# Altium footprint library LimeMicroAltiumLib.PcbLib: 876 footprints (part 12 of 57)
Each footprint in its own frame and in the unit in brackets; x right, y up, seen from the top. Pads: shape width x height; smd on the part's side, far side on the other; paste and mask are expansions set on the pad; w line width, h text height; cw(c..) or ccw(c..) is an arc to the next point about the centre after c.
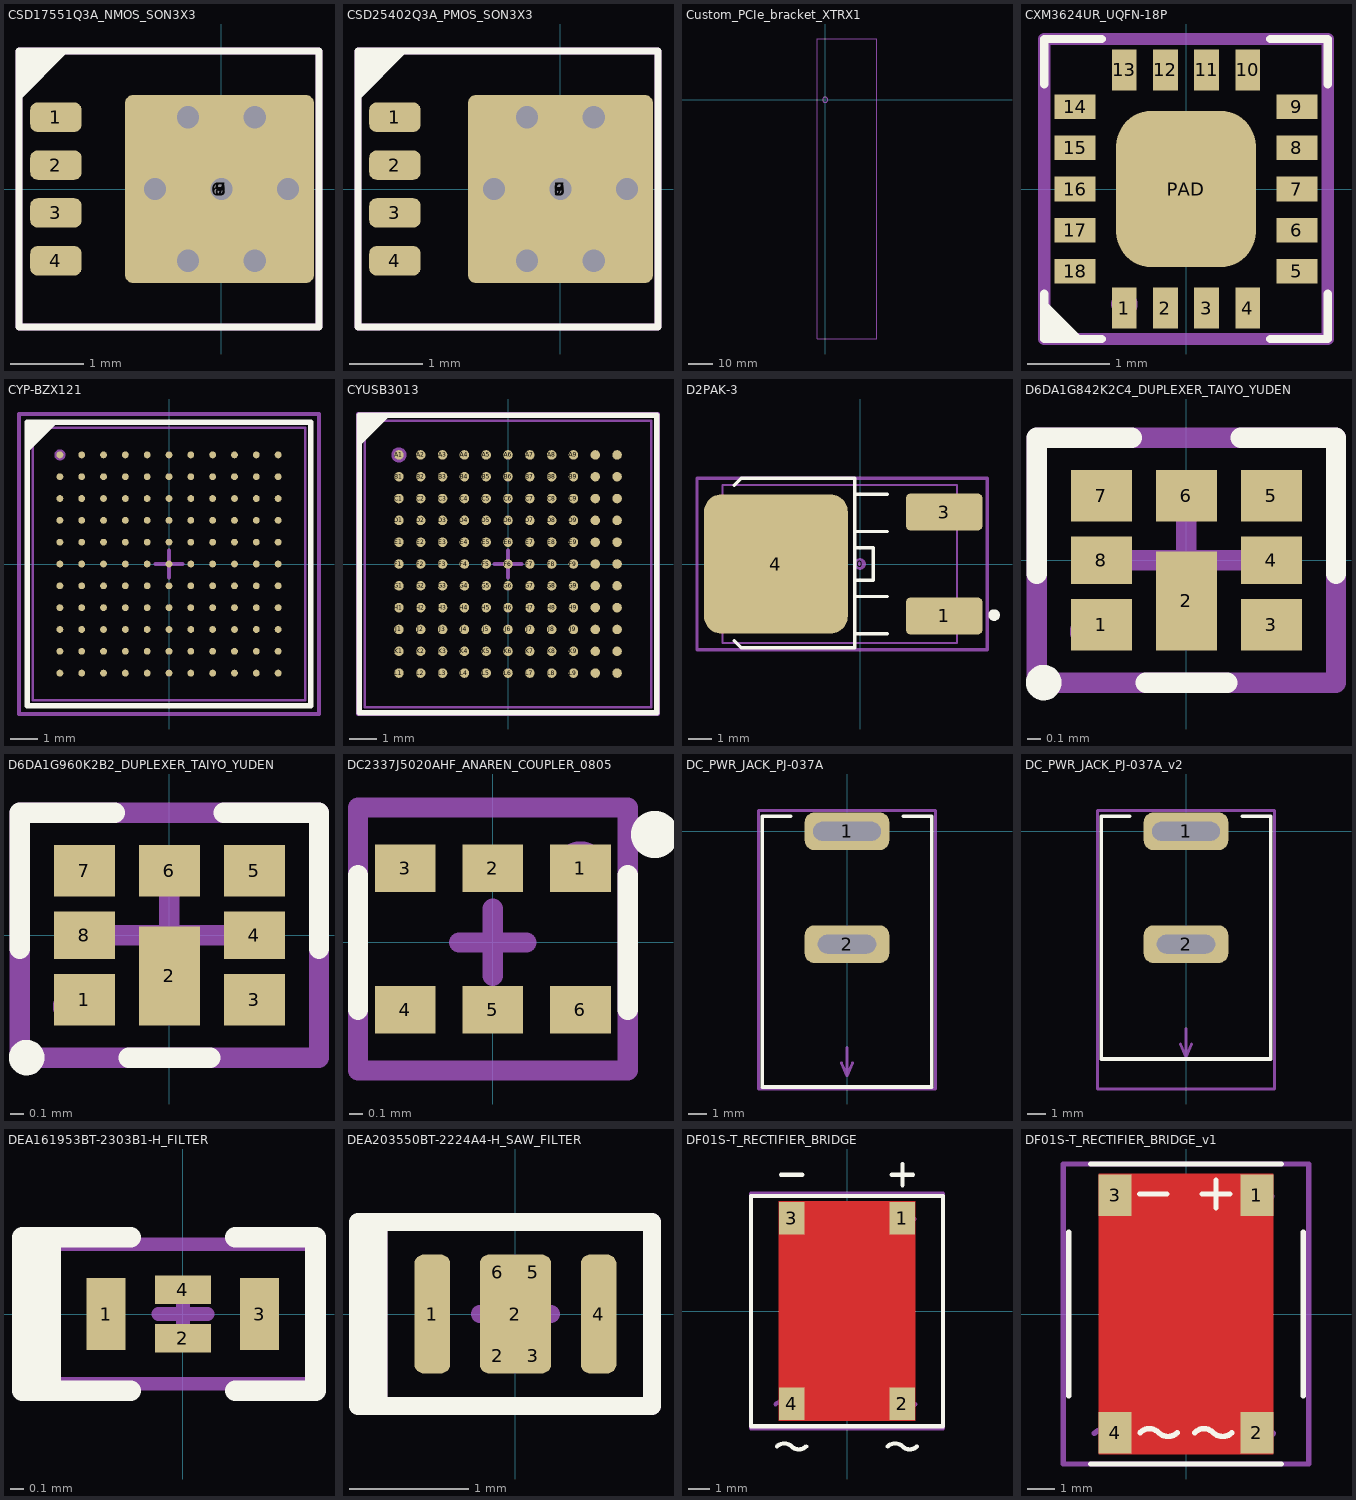
[diagram p11: the footprints below, top view; thin cyan lines are the x and y axes]

## CSD17551Q3A_NMOS_SON3X3 [mm]
pads (9):
  rrect50% 0.7x0.4 smd paste-1000 mask+0.05: 1(-2.248,0.975) 2(-2.248,0.325) 3(-2.248,-0.325) 4(-2.248,-0.975)
  rrect8% 2.51x2.55 smd paste-1000 mask+0.05: 5(0,0) 6(-0.053,0) 7(0,0) 8(0,0) 9(0,0)
via -0.453,0.975 diameter 0.6 hole 0.3
via 0.452,0.975 diameter 0.6 hole 0.3
via -0.453,-0.975 diameter 0.6 hole 0.3
via 0.452,-0.975 diameter 0.6 hole 0.3
via -0.905,0 diameter 0.6 hole 0.3
via 0,0 diameter 0.6 hole 0.3
via 0.905,0 diameter 0.6 hole 0.3
Top Overlay:
  region: -2.75,1.875 -2.75,1.2 -2.075,1.875
  lines w0.1: -2.75,-1.875 1.325,-1.875 1.325,1.875 -2.75,1.875 -2.75,-1.875
Top Paste:
  drawing of 12 lines, arcs and shapes, not listed
Top Solder:
  drawing of 5 lines, arcs and shapes, not listed
Mechanical 15:
  circle w0.15: c-2.275,0.975 r0.056
  lines w0.1: -0.5,0 0,0 ; 0,-0.5 0,0 ; 0,0.5 0,0 ; 0.5,0 0,0 ; -2.75,-1.875 -2.75,1.875 1.325,1.875 1.325,-1.875 -2.75,-1.875
  text ".Designator" at 0,0 h0.55
3D body "Trans_Texas_Instruments_CSD17551Q3A_eec.STEP": height 0.25, standoff 0, extent -2.698,-1.875 1.302,1.875

## CSD25402Q3A_PMOS_SON3X3 [mm]
pads (9):
  rrect50% 0.7x0.4 smd paste-1000 mask+0.05: 1(-2.248,0.975) 2(-2.248,0.325) 3(-2.248,-0.325) 4(-2.248,-0.975)
  rrect8% 2.51x2.55 smd paste-1000 mask+0.05: 5(0,0) 6(0,0) 7(0,0) 8(0,0) 9(0,0)
via -0.453,0.975 diameter 0.6 hole 0.3
via 0.452,0.975 diameter 0.6 hole 0.3
via -0.453,-0.975 diameter 0.6 hole 0.3
via 0.452,-0.975 diameter 0.6 hole 0.3
via -0.905,0 diameter 0.6 hole 0.3
via 0,0 diameter 0.6 hole 0.3
via 0.905,0 diameter 0.6 hole 0.3
Top Overlay:
  region: -2.75,1.875 -2.75,1.2 -2.075,1.875
  lines w0.1: -2.75,-1.875 1.325,-1.875 1.325,1.875 -2.75,1.875 -2.75,-1.875
Top Paste:
  drawing of 12 lines, arcs and shapes, not listed
Top Solder:
  drawing of 5 lines, arcs and shapes, not listed
Mechanical 15:
  circle w0.15: c-2.275,0.975 r0.056
  lines w0.1: -0.5,0 0,0 ; 0,-0.5 0,0 ; 0,0.5 0,0 ; 0.5,0 0,0 ; -2.75,-1.875 -2.75,1.875 1.325,1.875 1.325,-1.875 -2.75,-1.875
  text ".Designator" at 0,0 h0.55
3D body "Trans_Texas_Instruments_CSD17551Q3A_eec.STEP": height 0.25, standoff 0, extent -2.698,-1.875 1.302,1.875

## Custom_PCIe_bracket_XTRX1 [mm] "3D STEP model of XTRX Custom-made PCIe bracket v1"
Mechanical 15:
  circle w0.2: c0,0 r1.047
  lines w0.15: -3.2,-96.4 20.8,-96.4 20.8,24.5 -3.2,24.5 -3.2,-96.4
  text ".Designator" at 7.5,-10.6 h0.55
3D body "PCIe 1XTRX v11 Full Height Bracket w holes rev5.stp": height 4.45, standoff -17.15, extent -3.175,-96.367 20.828,24.492

## CXM3624UR_UQFN-18P [mm]
pads (19):
  rect 0.3x0.5 smd mask+0.05: 1(-0.75,-1.45) 2(-0.25,-1.45) 3(0.25,-1.45) 4(0.75,-1.45) 10(0.75,1.45) 11(0.25,1.45) 12(-0.25,1.45) 13(-0.75,1.45)
  rect 0.5x0.3 smd mask+0.05: 5(1.35,-1) 6(1.35,-0.5) 7(1.35,0) 8(1.35,0.5) 9(1.35,1) 14(-1.35,1) 15(-1.35,0.5) 16(-1.35,0) 17(-1.35,-0.5) 18(-1.35,-1)
  rrect50% 1.7x1.9 smd paste-0.1 mask+0.05: PAD(0,0)
Top Overlay:
  region: -1.725,-1.35 -1.25,-1.825 -1.725,-1.825
  lines w0.1: -1.725,-1.275 -1.725,-1.825 -1.025,-1.825 ; -1.725,1.275 -1.725,1.825 -1.025,1.825 ; 1.025,-1.825 1.725,-1.825 1.725,-1.275 ; 1.025,1.825 1.725,1.825 1.725,1.275
Mechanical 15:
  circle w0.25: c-0.75,-1.4 r0.035
  lines w0.15: -0.5,0 0,0 ; 0,-0.5 0,0 ; 0,0.5 0,0 ; 0.5,0 0,0 ; -1.725,-1.825 -1.725,1.825 1.725,1.825 1.725,-1.825 -1.725,-1.825
  text ".Designator" at 0,0 h0.55
3D body: height 0.56, standoff 0, extent -1.198,-1.3 -0.8,-0.9
3D body: height 0.55, standoff 0, extent -1.4,-1.5 1.4,1.5

## CYP-BZX121 [mm] "BGA, 121-Balls, Body 10x10mm, Pitch 0.8mm"
height 1.2
pads (121):
  round 0.25 smd: A1(-4,4) A2(-3.2,4) A3(-2.4,4) A4(-1.6,4) A5(-0.8,4) A6(0,4) A7(0.8,4) A8(1.6,4) A9(2.4,4) A10(3.2,4) A11(4,4) B1(-4,3.2) B2(-3.2,3.2) B3(-2.4,3.2) B4(-1.6,3.2) B5(-0.8,3.2) B6(0,3.2) B7(0.8,3.2) B8(1.6,3.2) B9(2.4,3.2) B10(3.2,3.2) B11(4,3.2) C1(-4,2.4) C2(-3.2,2.4) C3(-2.4,2.4) C4(-1.6,2.4) C5(-0.8,2.4) C6(0,2.4) C7(0.8,2.4) C8(1.6,2.4) C9(2.4,2.4) C10(3.2,2.4) C11(4,2.4) D1(-4,1.6) D2(-3.2,1.6) D3(-2.4,1.6) D4(-1.6,1.6) D5(-0.8,1.6) D6(0,1.6) D7(0.8,1.6) D8(1.6,1.6) D9(2.4,1.6) D10(3.2,1.6) D11(4,1.6) E1(-4,0.8) E2(-3.2,0.8) E3(-2.4,0.8) E4(-1.6,0.8) E5(-0.8,0.8) E6(0,0.8) E7(0.8,0.8) E8(1.6,0.8) E9(2.4,0.8) E10(3.2,0.8) E11(4,0.8) F1(-4,0) F2(-3.2,0) F3(-2.4,0) F4(-1.6,0) F5(-0.8,0) F6(0,0) F7(0.8,0) F8(1.6,0) F9(2.4,0) F10(3.2,0) F11(4,0) G1(-4,-0.8) G2(-3.2,-0.8) G3(-2.4,-0.8) G4(-1.6,-0.8) G5(-0.8,-0.8) G6(0,-0.8) G7(0.8,-0.8) G8(1.6,-0.8) G9(2.4,-0.8) G10(3.2,-0.8) G11(4,-0.8) H1(-4,-1.6) H2(-3.2,-1.6) H3(-2.4,-1.6) H4(-1.6,-1.6) H5(-0.8,-1.6) H6(0,-1.6) H7(0.8,-1.6) H8(1.6,-1.6) H9(2.4,-1.6) H10(3.2,-1.6) H11(4,-1.6) J1(-4,-2.4) J2(-3.2,-2.4) J3(-2.4,-2.4) J4(-1.6,-2.4) J5(-0.8,-2.4) J6(0,-2.4) J7(0.8,-2.4) J8(1.6,-2.4) J9(2.4,-2.4) J10(3.2,-2.4) J11(4,-2.4) K1(-4,-3.2) K2(-3.2,-3.2) K3(-2.4,-3.2) K4(-1.6,-3.2) K5(-0.8,-3.2) K6(0,-3.2) K7(0.8,-3.2) K8(1.6,-3.2) K9(2.4,-3.2) K10(3.2,-3.2) K11(4,-3.2) L1(-4,-4) L2(-3.2,-4) L3(-2.4,-4) L4(-1.6,-4) L5(-0.8,-4) L6(0,-4) L7(0.8,-4) L8(1.6,-4) L9(2.4,-4) L10(3.2,-4) L11(4,-4)
Top Overlay:
  region: -4.2,5.2 -5.2,4.2 -5.2,5.2
  lines w0.2: -5.2,4.2 -4.2,5.2 ; -5.2,-5.2 -5.2,5.2 5.2,5.2 5.2,-5.2 -5.2,-5.2
Mechanical 13:
  lines w0.1: -5,-5 -5,5 5,5 5,-5 -5,-5
Mechanical 15:
  circle w0.2: c-4,4 r0.1
  lines w0.15: -0.5,0 0.5,0 ; 0,-0.5 0,0.5 ; -5.5,-5.5 -5.5,5.5 5.5,5.5 5.5,-5.5 -5.5,-5.5
  text ".Designator" at 0,0 h0.55
3D body: height 1.2, standoff 0.15, extent -5,-5 5,5
3D body: height 1.3, standoff 1.2, extent -4.4,3.6 -3.6,4.4

## CYUSB3013 [mm] "BGA, 121-Leads, Body 10,50x10,50mmx1,10mm, Pitch 0,80mm"
height 1.1
pads (121):
  round 0.35 smd: A1(-4,4) A2(-3.2,4) A3(-2.4,4) A4(-1.6,4) A5(-0.8,4) A6(0,4) A7(0.8,4) A8(1.6,4) A9(2.4,4) A10(3.2,4) A11(4,4) B1(-4,3.2) B2(-3.2,3.2) B3(-2.4,3.2) B4(-1.6,3.2) B5(-0.8,3.2) B6(0,3.2) B7(0.8,3.2) B8(1.6,3.2) B9(2.4,3.2) B10(3.2,3.2) B11(4,3.2) C1(-4,2.4) C2(-3.2,2.4) C3(-2.4,2.4) C4(-1.6,2.4) C5(-0.8,2.4) C6(0,2.4) C7(0.8,2.4) C8(1.6,2.4) C9(2.4,2.4) C10(3.2,2.4) C11(4,2.4) D1(-4,1.6) D2(-3.2,1.6) D3(-2.4,1.6) D4(-1.6,1.6) D5(-0.8,1.6) D6(0,1.6) D7(0.8,1.6) D8(1.6,1.6) D9(2.4,1.6) D10(3.2,1.6) D11(4,1.6) E1(-4,0.8) E2(-3.2,0.8) E3(-2.4,0.8) E4(-1.6,0.8) E5(-0.8,0.8) E6(0,0.8) E7(0.8,0.8) E8(1.6,0.8) E9(2.4,0.8) E10(3.2,0.8) E11(4,0.8) F1(-4,0) F2(-3.2,0) F3(-2.4,0) F4(-1.6,0) F5(-0.8,0) F6(0,0) F7(0.8,0) F8(1.6,0) F9(2.4,0) F10(3.2,0) F11(4,0) G1(-4,-0.8) G2(-3.2,-0.8) G3(-2.4,-0.8) G4(-1.6,-0.8) G5(-0.8,-0.8) G6(0,-0.8) G7(0.8,-0.8) G8(1.6,-0.8) G9(2.4,-0.8) G10(3.2,-0.8) G11(4,-0.8) H1(-4,-1.6) H2(-3.2,-1.6) H3(-2.4,-1.6) H4(-1.6,-1.6) H5(-0.8,-1.6) H6(0,-1.6) H7(0.8,-1.6) H8(1.6,-1.6) H9(2.4,-1.6) H10(3.2,-1.6) H11(4,-1.6) J1(-4,-2.4) J2(-3.2,-2.4) J3(-2.4,-2.4) J4(-1.6,-2.4) J5(-0.8,-2.4) J6(0,-2.4) J7(0.8,-2.4) J8(1.6,-2.4) J9(2.4,-2.4) J10(3.2,-2.4) J11(4,-2.4) K1(-4,-3.2) K2(-3.2,-3.2) K3(-2.4,-3.2) K4(-1.6,-3.2) K5(-0.8,-3.2) K6(0,-3.2) K7(0.8,-3.2) K8(1.6,-3.2) K9(2.4,-3.2) K10(3.2,-3.2) K11(4,-3.2) L1(-4,-4) L2(-3.2,-4) L3(-2.4,-4) L4(-1.6,-4) L5(-0.8,-4) L6(0,-4) L7(0.8,-4) L8(1.6,-4) L9(2.4,-4) L10(3.2,-4) L11(4,-4)
Top Overlay:
  region: -4.45,5.45 -5.45,4.45 -5.45,5.45
  lines w0.2: -5.45,4.45 -4.45,5.45 ; -5.45,-5.45 -5.45,5.45 5.45,5.45 5.45,-5.45 -5.45,-5.45
Mechanical 13:
  lines w0.1: -5.25,-5.25 -5.25,5.25 5.25,5.25 5.25,-5.25 -5.25,-5.25
Mechanical 15:
  circle w0.35: c-4,4 r0.1
  lines w0.15: -0.5,0 0.5,0 ; 0,-0.5 0,0.5 ; -5.5,-5.5 -5.5,5.5 5.5,5.5 5.5,-5.5 -5.5,-5.5
  text ".Designator" at 0,0 h0.55
3D body: height 1.11, standoff 1, extent -4.397,3.601 -3.6,4.399
3D body: height 1.1, standoff 0.25, extent -5.25,-5.25 5.25,5.25

## D2PAK-3 [mm] "D-PAK/TO-263-3; 3 Leads (1 Cropped); Body 14.7 (inc. leads) x 10.2 mm (LxW max)"
height 4.572
pads (4):
  round 0.508 on Mech15: 0(0,0)
  rrect25% 3.3x1.6 smd: 1(3.626,-2.24) 3(3.626,2.24)
  rrect25% 6.2x6 smd: 4(-3.626,0)
Top Overlay:
  circle w0.25: c5.774,-2.2 r0.125
  lines w0.15: -5.426,-3.3 -5.126,-3.6 -0.225,-3.6 -0.225,3.7 -5.126,3.7 -5.426,3.4 ; 1.174,-3 -0.226,-3 -0.226,-1.4 1.174,-1.4 ; 1.174,1.4 -0.226,1.4 -0.226,3 1.174,3 ; -0.226,-0.7 0.574,-0.7 0.574,0.7 -0.226,0.7 -0.226,-0.7
Mechanical 13:
  lines w0.076: -5.928,-3.4 -5.928,3.4 4.174,3.4 4.174,-3.4 -5.928,-3.4
Mechanical 15:
  circle w0.3: c3.674,-2.2 r0.1
  lines w0.15: -7.026,-3.7 5.474,-3.7 5.474,3.7 -7.026,3.7 -7.026,-3.7
  text ".Designator" at 0,0 h0.55
3D body "User Library-DPAK_TO-252AA.step": height 2.37, standoff -0.03, extent -5.928,-3.367 4.172,3.367

## D6DA1G842K2C4_DUPLEXER_TAIYO_YUDEN [mm]
pads (8):
  rect 0.45x0.38 smd mask+0.05: 1(-0.625,-0.475) 3(0.625,-0.475) 5(0.625,0.475) 6(0,0.475) 7(-0.625,0.475)
  rect 0.45x0.73 smd mask+0.05: 2(0,-0.3)
  rect 0.45x0.35 smd mask+0.05: 4(0.625,0) 8(-0.625,0)
Top Overlay:
  circle w0.15: c-1.05,-0.9 r0.056
  lines w0.15: -1.1,-0.1 -1.1,0.9 -0.4,0.9 ; -0.3,-0.9 0.3,-0.9 ; 0.4,0.9 1.1,0.9 1.1,-0.1
Top Solder:
  region: -0.9,0.715 -0.9,-0.715 0.9,-0.715 0.9,0.715
Mechanical 13:
  region: -0.775,-0.6 -0.775,-0.37 -0.475,-0.37 -0.475,-0.6
  region: -0.775,-0.14 -0.775,0.09 -0.475,0.09 -0.475,-0.14
  region: -0.775,0.32 -0.775,0.55 -0.475,0.55 -0.475,0.32
  region: -0.15,0.32 -0.15,0.55 0.15,0.55 0.15,0.32
  region: 0.775,0.32 0.775,0.55 0.475,0.55 0.475,0.32
  region: 0.775,-0.14 0.775,0.09 0.475,0.09 0.475,-0.14
  region: 0.775,-0.6 0.775,-0.37 0.475,-0.37 0.475,-0.6
  region: -0.15,-0.6 -0.15,-0.025 0.15,-0.025 0.15,-0.6
Mechanical 15:
  circle w0.15: c-0.725,-0.525 r0.056
  lines w0.15: -0.4,0 0,0 ; 0,-0.4 0,0 ; 0,0.4 0,0 ; 0.4,0 0,0 ; -1.1,-0.9 1.1,-0.9 1.1,0.9 -1.1,0.9 -1.1,-0.9
  text ".Designator" at 0,0 h0.55
3D body: height 0.59, standoff 0, extent -0.724,-0.57 -0.525,-0.37
3D body: height 0.57, standoff 0, extent -0.9,-0.7 0.9,0.7

## D6DA1G960K2B2_DUPLEXER_TAIYO_YUDEN [mm]
pads (8):
  rect 0.45x0.38 smd mask+0.05: 1(-0.625,-0.475) 3(0.625,-0.475) 5(0.625,0.475) 6(0,0.475) 7(-0.625,0.475)
  rect 0.45x0.73 smd mask+0.05: 2(0,-0.3)
  rect 0.45x0.35 smd mask+0.05: 4(0.625,0) 8(-0.625,0)
Top Overlay:
  circle w0.15: c-1.05,-0.9 r0.056
  lines w0.15: -1.1,-0.1 -1.1,0.9 -0.4,0.9 ; -0.3,-0.9 0.3,-0.9 ; 0.4,0.9 1.1,0.9 1.1,-0.1
Top Solder:
  region: -0.9,0.715 -0.9,-0.715 0.9,-0.715 0.9,0.715
Mechanical 13:
  region: -0.775,-0.6 -0.775,-0.37 -0.475,-0.37 -0.475,-0.6
  region: -0.775,-0.14 -0.775,0.09 -0.475,0.09 -0.475,-0.14
  region: -0.775,0.32 -0.775,0.55 -0.475,0.55 -0.475,0.32
  region: -0.15,0.32 -0.15,0.55 0.15,0.55 0.15,0.32
  region: 0.775,0.32 0.775,0.55 0.475,0.55 0.475,0.32
  region: 0.775,-0.14 0.775,0.09 0.475,0.09 0.475,-0.14
  region: 0.775,-0.6 0.775,-0.37 0.475,-0.37 0.475,-0.6
  region: -0.15,-0.6 -0.15,-0.025 0.15,-0.025 0.15,-0.6
Mechanical 15:
  circle w0.15: c-0.725,-0.525 r0.056
  lines w0.15: -0.4,0 0,0 ; 0,-0.4 0,0 ; 0,0.4 0,0 ; 0.4,0 0,0 ; -1.1,-0.9 1.1,-0.9 1.1,0.9 -1.1,0.9 -1.1,-0.9
  text ".Designator" at 0,0 h0.55
3D body: height 0.59, standoff 0, extent -0.724,-0.57 -0.525,-0.37
3D body: height 0.57, standoff 0, extent -0.9,-0.7 0.9,0.7

## DC2337J5020AHF_ANAREN_COUPLER_0805 [mm]
pads (6):
  rect 0.45x0.35 smd mask+0.05: 1(0.65,0.55) 2(0,0.55) 3(-0.65,0.55) 4(-0.65,-0.5) 5(0,-0.5) 6(0.65,-0.5)
Top Overlay:
  circle w0.3: c1.2,0.8 r0.025
  lines w0.15: -1,-0.5 -1,0.5 ; 1,-0.5 1,0.5
Mechanical 15:
  circle w0.3: c0.65,0.575 r0.025
  lines w0.15: -0.25,0 0.25,0 ; 0,-0.25 0,0.25 ; -1,-0.95 1,-0.95 1,1 -1,1 -1,-0.95
  text ".Designator" at 0,0 h0.55
3D body: height 0.6, standoff 0, extent 0.463,-0.075 0.663,0.15
3D body: height 0.6, standoff 0, extent -1,-0.6 1,0.6

## DC_PWR_JACK_PJ-037A [mm]
pads (2):
  rrect50% 4.5x2 hole 1 slot 3.6 at 0 deg mask+0.05: 1(0,0)
  rrect50% 4.5x2 hole 1 slot 3.1 at 0 deg mask+0.05: 2(0,-6)
Top Overlay:
  lines w0.2: -3,0.8 -4.5,0.8 -4.5,-13.6 4.5,-13.6 4.5,0.8 3,0.8
Mechanical 15:
  lines w0.15: -0.3,-12.3 0,-13 ; 0,-11.5 0,-13 ; 0.3,-12.3 0,-13 ; -4.7,-13.7 4.7,-13.7 4.7,1.1 -4.7,1.1 -4.7,-13.7
  text "board edge" at -2.6,-11.1 h0.55
  text ".Designator" at 0,0 h0.55
3D body "CUI_PJ-037A.step": height 11, standoff -3.5, extent -4.5,-13.7 4.5,0.8

## DC_PWR_JACK_PJ-037A_v2 [mm]
pads (2):
  rrect50% 4.5x2 hole 1 slot 3.6 at 0 deg mask+0.05: 1(0,0)
  rrect50% 4.5x2 hole 1 slot 3.1 at 0 deg mask+0.05: 2(0,-6)
Top Overlay:
  lines w0.2: -3,0.8 -4.5,0.8 -4.5,-12.1 4.5,-12.1 4.5,0.8 3,0.8
Mechanical 15:
  lines w0.15: -0.3,-11.3 0,-12 ; 0,-10.5 0,-12 ; 0.3,-11.3 0,-12 ; -4.7,-13.7 4.7,-13.7 4.7,1.1 -4.7,1.1 -4.7,-13.7
  text "board edge" at -2.6,-10.1 h0.55
  text ".Designator" at 0,0 h0.55
3D body "CUI_PJ-037A.step": height 11, standoff -3.5, extent -4.5,-13.7 4.5,0.8

## DEA161953BT-2303B1-H_FILTER [mm]
pads (4):
  rect 0.28x0.514 smd mask+0.02: 1(-0.55,0) 3(0.55,0)
  rect 0.4x0.205 smd mask+0.02: 2(0,-0.175) 4(0,0.175)
Top Overlay:
  region: -0.95,0.55 -1.15,0.55 -1.15,-0.55 -0.95,-0.55
  lines w0.15: -0.375,-0.55 -0.95,-0.55 ; -0.375,0.55 -0.95,0.55 ; 0.375,-0.55 0.95,-0.55 0.95,0.55 0.375,0.55 ; -0.95,-0.55 -1.15,-0.55 -1.15,0.55 -0.95,0.55 ; -0.95,-0.55 -0.95,0.55
Mechanical 15:
  circle w0.1: c-0.6,0 r0.035
  lines w0.1: -0.175,0 0.175,0 ; 0,-0.175 0,0.175 ; -1.175,-0.5 -1.175,0.5 0.975,0.5 0.975,-0.5 -1.175,-0.5
  text ".Designator" at 0,0 h0.55
3D body: height 2.05, standoff -0.7, extent -0.8,-0.4 0.8,0.4

## DEA203550BT-2224A4-H_SAW_FILTER [mm]
pads (7):
  rrect50% 0.3x1 smd mask+0.05: 1(-0.7,0) 4(0.7,0)
  rrect50% 0.3x0.3 smd mask+0.05: 2(-0.15,-0.35) 3(0.15,-0.35) 5(0.15,0.35) 6(-0.15,0.35)
  rrect50% 0.6x1 smd mask+0.05: 2(0,0)
Top Overlay:
  region: -1.15,-0.775 -1.325,-0.775 -1.325,0.775 -1.15,0.775
  lines w0.15: -1.15,-0.775 -1.325,-0.775 -1.325,0.775 -1.15,0.775 ; -1.15,-0.775 -1.15,0.775 ; -1.15,-0.775 1.15,-0.775 1.15,0.775 -1.15,0.775
Mechanical 15:
  lines w0.15: -0.3,0 0,0 ; 0,-0.3 0,0 ; 0,0.3 0,0 ; 0.3,0 0,0 ; -1.15,-0.775 -1.15,0.775 1.15,0.775 1.15,-0.775 -1.15,-0.775
  text ".Designator" at 0.15,0 h0.55
  text "1" at -0.8,0.2 h0.3
  text "4" at 0.7,0.2 h0.3
  text "IN" at -0.8,-0.5 h0.3
  text "OUT" at 0.1,-0.5 h0.3
3D body: height 0.65, standoff 0, extent -1,-0.625 1,0.625
3D body: height 0.65, standoff 0, extent -0.85,-0.375 -0.45,0.375

## DF01S-T_RECTIFIER_BRIDGE [mm]
pads (4):
  rect 1.2x1.52 smd mask+0.05: 1(2.6,4.35) 2(2.6,-4.35) 3(-2.6,4.35) 4(-2.6,-4.35)
Top Layer:
  pour cut-out: -3.2,-5.15 -3.2,5.15 3.2,5.15 3.2,-5.15
Top Overlay:
  lines w0.2: -3.283,-6.35 cw(c-2.941,-6.691) -2.941,-6.209 cw(c-2.941,-6.691) -2.6,-6.35 ccw(c-2.259,-6.009) -2.259,-6.491 ccw(c-2.259,-6.009) -1.917,-6.35 ; -3.1,6.4 -2.1,6.4 ; 1.917,-6.35 cw(c2.259,-6.691) 2.259,-6.209 cw(c2.259,-6.691) 2.6,-6.35 ccw(c2.941,-6.009) 2.941,-6.491 ccw(c2.941,-6.009) 3.283,-6.35 ; 2.1,6.4 3.1,6.4 ; 2.6,5.9 2.6,6.9 ; -4.5,-5.4 4.5,-5.4 4.5,5.4 -4.5,5.4 -4.5,-5.4
Mechanical 15:
  lines w0.2: -3.358,-4.375 cw(c-3.016,-4.716) -3.016,-4.234 cw(c-3.016,-4.716) -2.675,-4.375 ccw(c-2.334,-4.034) -2.334,-4.516 ccw(c-2.334,-4.034) -1.992,-4.375 ; -3.05,4.325 -2.05,4.325 ; -1,0 1,0 ; 0,-1 0,1 ; 1.842,-4.375 cw(c2.184,-4.716) 2.184,-4.234 cw(c2.184,-4.716) 2.525,-4.375 ccw(c2.866,-4.034) 2.866,-4.516 ccw(c2.866,-4.034) 3.208,-4.375 ; 2.15,4.325 3.15,4.325 ; 2.65,3.825 2.65,4.825 ; -4.5,-5.5 -4.5,5.5 4.5,5.5 4.5,-5.5 -4.5,-5.5
  text ".Designator" at 0,0 h0.55
3D body "User Library-DFXXS.step": height 3.6, standoff 0.03, extent -4.255,-5.15 4.255,5.15

## DF01S-T_RECTIFIER_BRIDGE_v1 [mm]
pads (4):
  rect 1.2x1.52 smd mask+0.05: 1(2.6,4.35) 2(2.6,-4.35) 3(-2.6,4.35) 4(-2.6,-4.35)
Top Layer:
  pour cut-out: -3.2,-5.15 -3.2,5.15 3.2,5.15 3.2,-5.15
Top Overlay:
  lines w0.2: -4.3,-3 -4.3,3 ; -3.5,-5.5 3.5,-5.5 ; -3.5,5.5 3.5,5.5 ; -1.7,4.4 -0.7,4.4 ; -1.683,-4.35 cw(c-1.341,-4.691) -1.341,-4.209 cw(c-1.341,-4.691) -1,-4.35 ccw(c-0.659,-4.009) -0.659,-4.491 ccw(c-0.659,-4.009) -0.317,-4.35 ; 0.317,-4.35 cw(c0.659,-4.691) 0.659,-4.209 cw(c0.659,-4.691) 1,-4.35 ccw(c1.341,-4.009) 1.341,-4.491 ccw(c1.341,-4.009) 1.683,-4.35 ; 0.6,4.4 1.6,4.4 ; 1.1,3.9 1.1,4.9 ; 4.3,-3 4.3,3
Mechanical 15:
  lines w0.2: -3.358,-4.375 cw(c-3.016,-4.716) -3.016,-4.234 cw(c-3.016,-4.716) -2.675,-4.375 ccw(c-2.334,-4.034) -2.334,-4.516 ccw(c-2.334,-4.034) -1.992,-4.375 ; -3.05,4.325 -2.05,4.325 ; -1,0 1,0 ; 0,-1 0,1 ; 1.842,-4.375 cw(c2.184,-4.716) 2.184,-4.234 cw(c2.184,-4.716) 2.525,-4.375 ccw(c2.866,-4.034) 2.866,-4.516 ccw(c2.866,-4.034) 3.208,-4.375 ; 2.15,4.325 3.15,4.325 ; 2.65,3.825 2.65,4.825 ; -4.5,-5.5 -4.5,5.5 4.5,5.5 4.5,-5.5 -4.5,-5.5
  text ".Designator" at 0,0 h0.55
3D body "User Library-DFXXS.step": height 3.6, standoff 0.03, extent -4.255,-5.15 4.255,5.15